# Altium footprint library KM_ALTIUM.PcbLib: 265 footprints (part 12 of 17)
Each footprint in its own frame and in the unit in brackets; x right, y up, seen from the top. Pads: shape width x height; smd on the part's side, far side on the other; paste and mask are expansions set on the pad; w line width, h text height; cw(c..) or ccw(c..) is an arc to the next point about the centre after c.
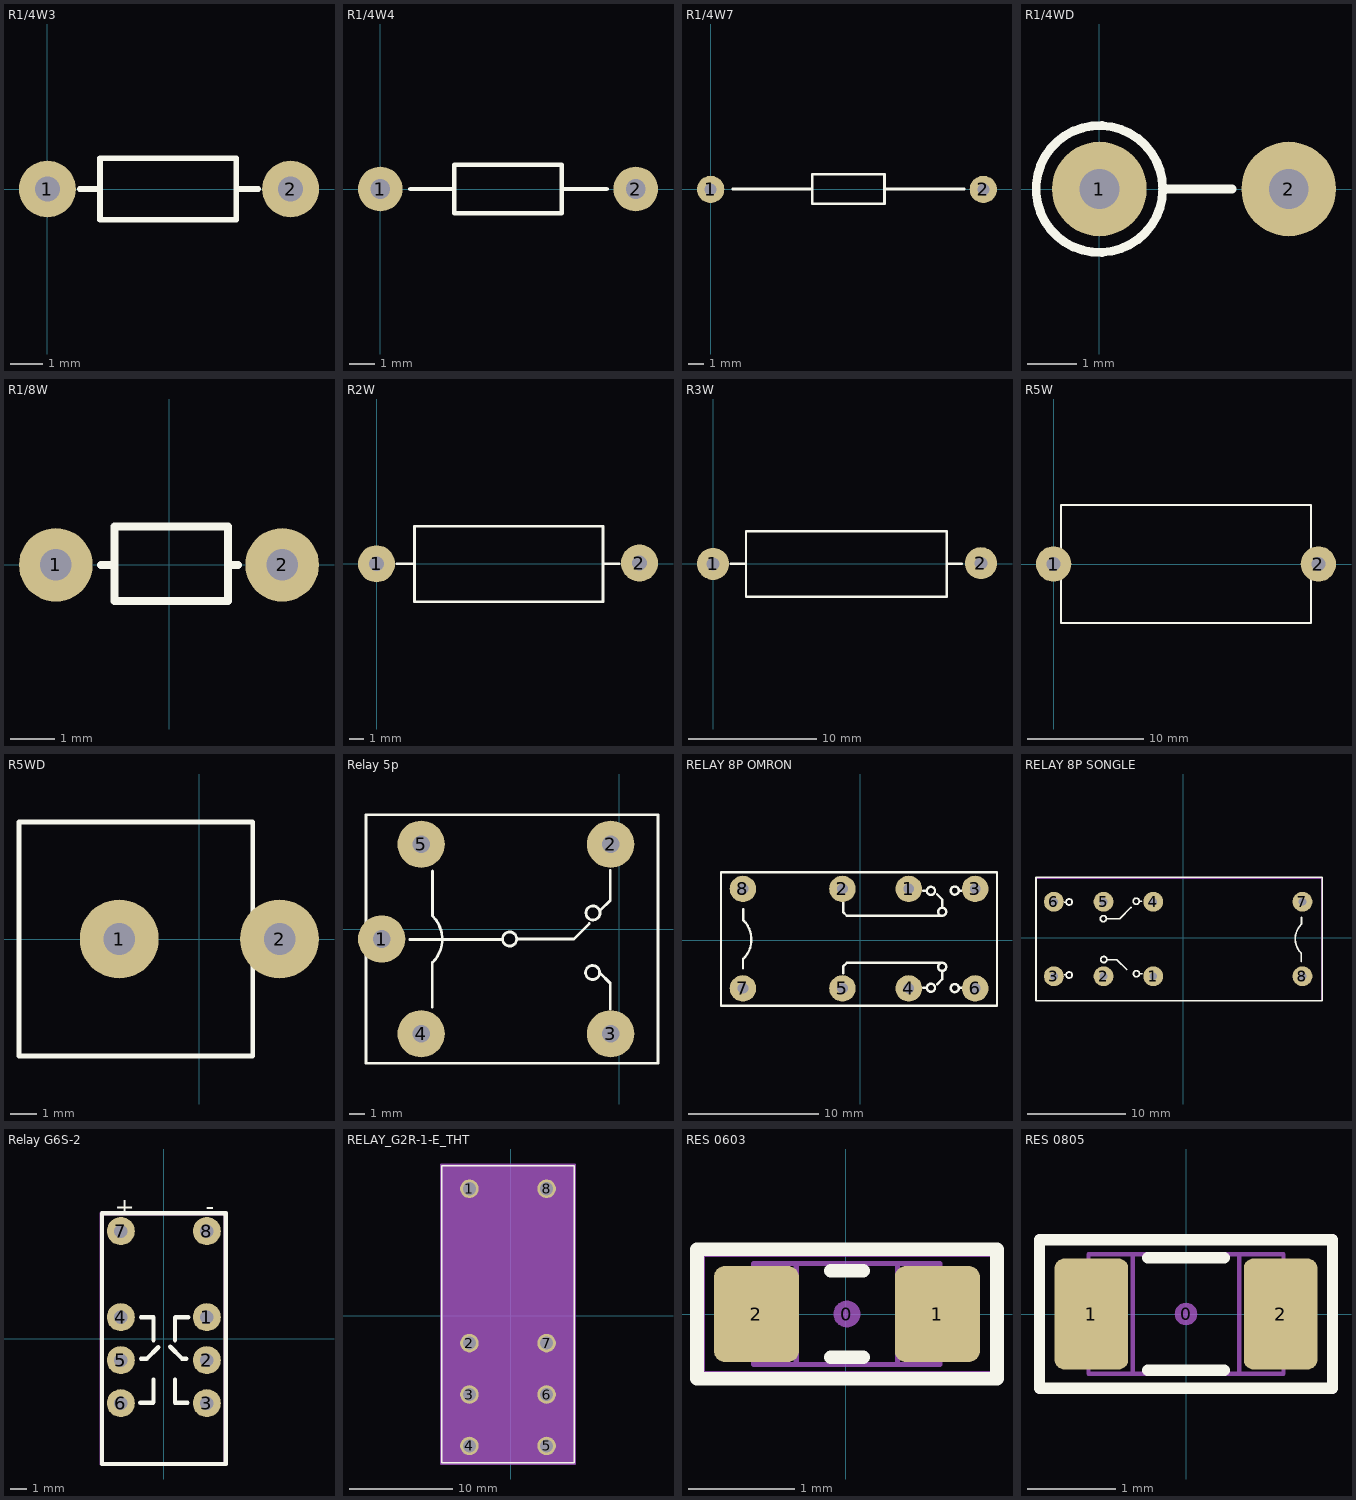
[diagram p11: the footprints below, top view; thin cyan lines are the x and y axes]

## R1/4W3 [mil] "R 1/4W, 2 Pin, 350mil"
height 100
pads (2):
  round 70 hole 31: 1(0,0) 2(300,0)
Top Overlay:
  lines w7: 40,0 65,0 ; 233,0 260,0 ; 65,-38 65,38 233,38 233,-38 65,-38
3D body "SW3DPS-RESISTOR 7_62MM DIP-DEFAULT.STEP": height 79.37, standoff -78.11, extent -9.45,-40 309.45,38.74

## R1/4W4 [mil] "R 1/4W, 2 Pin, 400mil"
height 100
pads (2):
  round 70 hole 31: 1(0,0) 2(400,0)
Top Overlay:
  lines w7: 47,0 116,0 ; 284,0 355,0 ; 116,-38 284,-38 284,38 116,38 116,-38
3D body "SW3dPS-RESISTOR, 0.25 W, 0.4 IN LEAD PITCH.STEP": height 115.5, standoff -100, extent -12,-45 412,46

## R1/4W7 [mil] "R 1/4W, 2 Pin, 600mil"
height 100
pads (2):
  round 70 hole 31: 1(0,0) 2(700,0)
Top Overlay:
  lines w7: 57,1 261,1 ; 446,1 651,1 ; 261,-37 446,-37 446,39 261,39 261,-37
3D body "SW3dPS-Resistor 5-band.STEP": height 142, standoff -125, extent 4.25,-65 705.75,67

## R1/4WD [mm] "R 1/4W, 2 Pin, 150mil"
height 2.54
pads (2):
  round 1.905 hole 0.8: 1(0,0) 2(3.81,0)
Top Overlay:
  circle w0.178: c0,0 r1.276
  lines w0.178: 1.27,0 2.667,0
3D body "SW3DPS-0_5W METAL FILM RESISTOR-DEFAULT.STEP": height 13.42, standoff -4.28, extent -1.778,-1.7 4.322,1.7

## R1/8W [mil] "R 1/8W, 2 pin, 300mil"
height 100
pads (2):
  round 65 hole 28: 1(-100,0) 2(100,0)
Top Overlay:
  lines w7: -60,0 -48,0 ; 54,0 61,0 ; -48,-32 52,-32 52,34 -48,34 -48,-32
3D body "SW3dPS-Res_Normal (0.25W).STEP": height 86.31, standoff -68.11, extent -135,-35.48 135,37

## R2W [mm] "R2W, 2 pin, 700mil"
height 5.08
pads (2):
  round 2.5 hole 1: 1(0,0) 2(17.755,0.051)
Top Overlay:
  lines w0.178: 1.372,0 2.565,0 ; 15.316,0 16.383,0 ; 2.565,0 2.565,2.54 15.291,2.54 15.291,-2.565 2.565,-2.565 2.565,0
3D body "SW3dPS-AXIAL_RESISTOR(3W).STEP": height 8.3, standoff -2, extent -2.362,-3.327 19.838,3.273

## R3W [mm] "R2W, 2 pin, 700mil"
height 5.08
pads (2):
  round 2.5 hole 1: 1(0,0) 2(20.855,0.051)
Top Overlay:
  lines w0.178: 1.372,0 2.565,0 ; 18.316,0 19.383,0 ; 2.565,0 2.565,2.54 18.2,2.54 18.2,-2.565 2.565,-2.565 2.565,0
3D body "SW3dPS-AXIAL_RESISTOR(3W).STEP": height 8.3, standoff -2, extent -0.6,-3.4 21.6,3.2

## R5W [mil] "R5W , 2 pin, 400 x 950mil"
height 400
pads (2):
  round 120 hole 47.24: 1(0,0) 2(900,0)
Top Overlay:
  lines w7: 25,-200 25,200 875,200 875,-200 25,-200
3D body "User Library-5W Resistor.STEP": height 362.6, standoff -98.43, extent -84.69,-190 954.68,191.89

## R5WD [mm] "R5W , 2 pin, 300 x 600 mil"
height 10.16
pads (2):
  round 3 hole 1.2: 1(-3.048,0) 2(3.048,0)
Top Overlay:
  lines w0.178: -6.858,-4.445 -6.858,4.445 2.032,4.445 2.032,-4.445 -6.858,-4.445
3D body "SW3dPS-5W Res.STEP": height 23.05, standoff -2.4, extent -8.648,-5.08 4.432,4.92

## Relay 5p [mil]
pads (5):
  round 120 hole 45: 1(-602,-25) 2(-22,215) 3(-22,-265) 4(-502,-265) 5(-502,215)
Top Overlay:
  circle w7: c-67.8,-110 r17.8
  circle w7: c-66.8,41 r17.8
  circle w7: c-277.8,-25 r17.8
  lines w7: -531,-26 -298,-26 ; -474,-198 -474,-85 ; -473,-84 ccw(c-530.5,-25.5) -472,32 ; -473,33 -473,147 ; -258,-25 -115,-25 -76,14 ; -50,-110 -23,-137 -23,-203 ; -49,47 -23,73 -23,149 ; -642,-340 -642,290 98,290 98,-340 -642,-340
3D body "User Library-SONGLE Relay SRU-12VDC-SL-C.STEP": height 602.36, standoff -196.85, extent -647.97,-330.24 104,280

## RELAY 8P OMRON [mil]
pads (8):
  round 80 hole 32: 1(146,155) 2(-54,155) 3(346,155) 4(146,-145) 5(-54,-145) 6(346,-145) 7(-354,-145) 8(-354,155)
Top Overlay:
  circle w7: c284.76,150 r12.24
  circle w7: c212.76,149 r12.24
  circle w7: c246.76,86 r12.24
  circle w7: c246.76,-80 r12.24
  circle w7: c212.76,-143 r12.24
  circle w7: c284.76,-144 r12.24
  lines w7: -354,-84 -354,-57 ; -353,-56 ccw(c-410.5,2.5) -352,60 ; -353,61 -353,94 ; -52,-100 -52,-79 -41,-68 245,-68 ; -52,113 -52,85 -41,74 245,74 ; 190,-143 198,-143 ; 190,149 198,149 ; 231,-133 247,-117 247,-94 ; 231,139 247,123 247,100 ; 299,-143 304,-143 ; 299,149 304,149 ; -420,-197 412,-197 412,205 -420,205 -420,-197
3D body "SW3dPS-DSY2Y.STEP": height 484.25, standoff -118.11, extent -413.45,-187.91 405.44,197.91

## RELAY 8P SONGLE [mil]
pads (8):
  round 80 hole 32: 1(-120,-155) 2(-320,-155) 3(-520,-155) 4(-120,145) 5(-320,145) 6(-520,145) 7(480.39,145) 8(480.39,-155)
Top Overlay:
  circle w7: c-458.76,-150 r12.24
  circle w7: c-187.76,-145 r12.24
  circle w7: c-319,-87.76 r12.24
  circle w7: c-321,76.76 r12.24
  circle w7: c-188.76,147 r12.24
  circle w7: c-458.76,144 r12.24
  lines w7: -478,-149 -473,-149 ; -478,143 -473,143 ; -307,77 -255,77 -210,122 ; -305,-88 -267,-88 -227,-128 ; -174,147 -166,147 ; -173,-145 -165,-145 ; 475,-62 cw(c533.5,-4.5) 476,54 ; 476,-96 476,-63 ; 477,55 477,82 ; -592,-254 560,-254 560,244 -592,244 -592,-254
Mechanical 13:
  lines w5: -588,-251 559,-251 559,240 -588,240 -588,-251
3D body "g2rl-2_5dc.stp": height 618.61, standoff -137.29, extent -586.88,-255 554.86,245

## Relay G6S-2 [mil]
pads (8):
  round 65 hole 31.5: 1(100,50) 2(100,-50) 3(100,-150) 4(-100,50) 5(-100,-50) 6(-100,-150) 7(-100,250) 8(100,250)
Top Overlay:
  lines w10: -55,-149 -25,-149 -24,-148 -24,-95 ; -53,-47 -40,-47 -13,-20 ; -53,50 -24,50 -24,-4 ; 15,-19 42,-46 42,-47 52,-47 ; 26,-95 26,-149 55,-149 ; 26,-4 26,49 27,50 57,50 ; -143.7,-291.34 -143.7,291.34 143.7,291.34 143.7,-291.34 -143.7,-291.34
  text "-" at 98,332 h70
  text "+" at -114,336 h70
Mechanical 13:
  lines w10: -144,-291.34 143.7,-291.34 143.7,291.34 -144,291.34 -144,-291.34
3D body "G6S_2.step": height 362.2, standoff -116.14, extent -143,-291.34 144.4,291.34

## RELAY_G2R-1-E_THT [mil] "G2R-1-E-DC12"
pads (8):
  round 71 / inner round 60 / far side round 71 hole 51 paste-35.5 mask+0: 1(-157.8,486.65) 2(-157.8,-103.9) 3(-157.8,-300.75) 4(-157.8,-497.6) 5(137.48,-497.6) 6(137.48,-300.75) 7(137.48,-103.9) 8(137.48,486.65)
Top Overlay:
  lines w6: -263.19,-561.65 242.87,-561.65 242.87,574.33 -263.19,574.33 -263.19,-561.65
Mechanical 13:
  lines w0: -22.16,569.33 ccw(c-10.16,569.33) 1.84,569.33
  lines w1: -258.19,-556.65 237.87,-556.65 237.87,569.33 -258.19,569.33 -258.19,-556.65
Mechanical 15:
  region: 247.87,-566.65 -268.19,-566.65 -268.19,579.33 247.87,579.33
  region: 237.87,-556.65 -258.19,-556.65 -258.19,569.33 237.87,569.33
  lines w6: -268.19,-566.65 -268.19,579.33 247.87,579.33 247.87,-566.65 -268.19,-566.65
3D body "G2RL-1-E DC12--3DModel-STEP-1.STEP": height 618.11, standoff -137.8, extent -262.13,-564.53 237.87,577.21

## RES 0603 [mm]
pads (3):
  round 0.254 on Mech15: 0(0.012,0)
  rrect25% 0.8x0.9 smd: 1(0.862,0) 2(-0.838,0)
Top Overlay:
  lines w0.127: -0.141,-0.406 0.164,-0.406 ; -0.141,0.406 0.164,0.406 ; -1.397,-0.61 -1.397,0.61 1.422,0.61 1.422,-0.61 -1.397,-0.61
Mechanical 13:
  lines w0.05: -0.863,-0.475 -0.463,-0.475 -0.463,0.475 -0.863,0.475 -0.863,-0.475 ; -0.463,-0.474 0.487,-0.474 -0.463,-0.474 ; -0.463,0.474 0.487,0.474 -0.463,0.474 ; 0.487,-0.475 0.487,0.475 0.887,0.475 0.887,-0.475 0.487,-0.475
Mechanical 15:
  lines w0.1: -1.372,-0.584 1.422,-0.584 1.422,0.584 -1.372,0.584 -1.372,-0.584
3D body "RES 0603 (1608 metric).STEP": height 0.54, standoff -0.01, extent -0.863,-0.475 0.887,0.475

## RES 0805 [mm]
pads (3):
  round 0.254 on Mech15: 0(0,0)
  rrect25% 0.83x1.25 smd: 1(-1.067,0) 2(1.067,0)
Top Overlay:
  lines w0.127: -0.432,-0.635 0.432,-0.635 ; -0.432,0.635 0.432,0.635 ; -1.651,-0.838 -1.651,0.838 1.651,0.838 1.651,-0.838 -1.651,-0.838
Mechanical 13:
  lines w0.05: 0.6,-0.674 -0.6,-0.674 ; -0.6,-0.675 -0.6,0.675 -1.1,0.675 -1.1,-0.675 -0.6,-0.675 ; -0.6,-0.674 0.6,-0.674 ; 0.6,-0.675 0.6,0.675 ; 0.6,-0.675 1.1,-0.675 1.1,0.675 0.6,0.675 ; 0.6,0.674 -0.6,0.674 0.6,0.674
Mechanical 15:
  lines w0.1: -1.651,-0.85 1.651,-0.85 1.651,0.85 -1.651,0.85 -1.651,-0.85
3D body "User Library-SMD RESISTOR-10805.STEP": height 0.61, standoff 0.01, extent -1,-0.625 1,0.625